# Altium integrated library Resistores_PTH.IntLib: 78 symbols
Pins are listed as number, name and electrical type; pins without a type are passive.

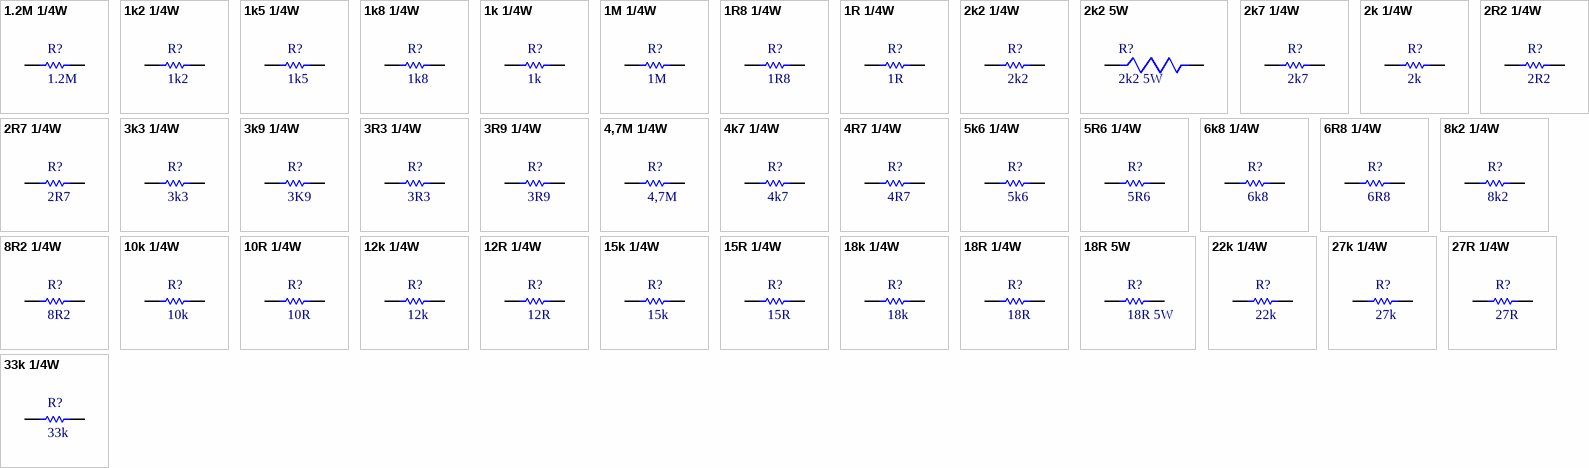
[diagram p0: symbols 1.2M 1/4W to 33k 1/4W]

## 1.2M 1/4W
designator R?, comment 1.2M
RESISTOR AXIAL 1.2M 1/4W +-5%
footprint 1.2M 1/4W RES-50
footprint 1.2M 1/4W RES-40
pins: 1, 2

## 1k2 1/4W
designator R?, comment 1k2
RESISTOR AXIAL 1k2 1/4W +-5%
footprint 1k2 1/4W RES-40
pins: 1, 2

## 1k5 1/4W
designator R?, comment 1k5
RESISTOR AXIAL 1k5 1/4W +-5%
footprint 1k5 1/4W RES-40
pins: 1, 2

## 1k8 1/4W
designator R?, comment 1k8
RESISTOR AXIAL 1k8 1/4W +-5%
footprint 1k8 1/4W RES-40
pins: 1, 2

## 1k 1/4W
designator R?, comment 1k
RESISTOR AXIAL 1kR 1/4W +-5%
footprint 1K 1/4W RES-50
footprint 1k 1/4W RES-40
pins: 1, 2

## 1M 1/4W
designator R?, comment 1M
RESISTOR AXIAL 1M 1/4W +-5%
footprint 1M 1/4W RES-50
footprint 1M 1/4W RES-40
pins: 1, 2

## 1R8 1/4W
designator R?, comment 1R8
RESISTOR AXIAL 1R8 1/4W +-5%
footprint 1R8 1/4W RES-40
pins: 1, 2

## 1R 1/4W
designator R?, comment 1R
RESISTOR AXIAL 1R 1/4W +-5%
footprint 1R 1/4W RES-50
footprint 1R 1/4W RES-40
pins: 1, 2

## 2k2 1/4W
designator R?, comment 2k2
RESISTOR AXIAL 2k2 1/4W +-5%
footprint 2k2 1/4W RES-40
pins: 1, 2

## 2k2 5W
designator R?
RESISTOR AXIAL 2k2 5W 10%
footprint 2K2 5W 10% 24mm
pins: 1, 2

## 2k7 1/4W
designator R?, comment 2k7
RESISTOR AXIAL 2k7 1/4W +-5%
footprint 2k7 1/4W RES-40
pins: 1, 2

## 2k 1/4W
designator R?, comment 2k
RESISTOR AXIAL 2k 1/4W +-5%
footprint 2k 1/4W RES-40
pins: 1, 2

## 2R2 1/4W
designator R?, comment 2R2
RESISTOR AXIAL 2R2 1/4W +-5%
footprint 2R2 1/4W RES-40
pins: 1, 2

## 2R7 1/4W
designator R?, comment 2R7
RESISTOR AXIAL 2R7 1/4W +-5%
footprint 2R7 1/4W RES-40
pins: 1, 2

## 3k3 1/4W
designator R?, comment 3k3
RESISTOR AXIAL 3k3 1/4W +-5%
footprint 3k3 1/4W RES-40
pins: 1, 2

## 3k9 1/4W
designator R?, comment 3K9
RESISTOR AXIAL 3k9 1/4W +-5%
footprint 3k9 1/4W RES-40
pins: 1, 2

## 3R3 1/4W
designator R?, comment 3R3
RESISTOR AXIAL 3R3 1/4W +-5%
footprint 3R3 1/4W RES-40
pins: 1, 2

## 3R9 1/4W
designator R?, comment 3R9
RESISTOR AXIAL 3R9 1/4W +-5%
footprint 3R9 1/4W RES-40
pins: 1, 2

## 4,7M 1/4W
designator R?, comment 4,7M
RESISTOR AXIAL 4,7M 1/4W +-5%
footprint 4.7M 1/4W RES-50
pins: 1, 2

## 4k7 1/4W
designator R?, comment 4k7
RESISTOR AXIAL 4k7 1/4W +-5%
footprint 4k7 1/4W RES-50
footprint 4k7 1/4W RES-40
pins: 1, 2

## 4R7 1/4W
designator R?, comment 4R7
RESISTOR AXIAL 4R7 1/4W +-5%
footprint 4R7 1/4W RES-50
footprint 4R7 1/4W RES-40
pins: 1, 2

## 5k6 1/4W
designator R?, comment 5k6
RESISTOR AXIAL 5k6 1/4W +-5%
footprint 5k6 1/4W RES-40
pins: 1, 2

## 5R6 1/4W
designator R?, comment 5R6
RESISTOR AXIAL 5R6 1/4W +-5%
footprint 5R6 1/4W RES-40
pins: 1, 2

## 6k8 1/4W
designator R?, comment 6k8
RESISTOR AXIAL 6k8 1/4W +-5%
footprint 6K8 1/4W RES-50
footprint 6k8 1/4W RES-40
pins: 1, 2

## 6R8 1/4W
designator R?, comment 6R8
RESISTOR AXIAL 6R8 1/4W +-5%
footprint 6R8 1/4W RES-40
pins: 1, 2

## 8k2 1/4W
designator R?, comment 8k2
RESISTOR AXIAL 8k2 1/4W +-5%
footprint 8k2 1/4W RES-40
pins: 1, 2

## 8R2 1/4W
designator R?, comment 8R2
RESISTOR AXIAL 8R2 1/4W +-5%
footprint 8R2 1/4W RES-40
pins: 1, 2

## 10k 1/4W
designator R?, comment 10k
RESISTOR AXIAL 10k 1/4W +-5%
footprint 10K 1/4W RES-50
footprint 10k 1/4W RES-40
pins: 1, 2

## 10R 1/4W
designator R?, comment 10R
RESISTOR AXIAL 10R 1/4W +-5%
footprint 10R 1/4W RES-40
pins: 1, 2

## 12k 1/4W
designator R?, comment 12k
RESISTOR AXIAL 12k 1/4W +-5%
footprint 12k 1/4W RES-40
pins: 1, 2

## 12R 1/4W
designator R?, comment 12R
RESISTOR AXIAL 12R 1/4W +-5%
footprint 12R 1/4W RES-40
pins: 1, 2

## 15k 1/4W
designator R?, comment 15k
RESISTOR AXIAL 15k 1/4W +-5%
footprint 15k 1/4W RES-40
pins: 1, 2

## 15R 1/4W
designator R?, comment 15R
RESISTOR AXIAL 15R 1/4W +-5%
footprint 15R 1/4W RES-40
pins: 1, 2

## 18k 1/4W
designator R?, comment 18k
RESISTOR AXIAL 18k 1/4W +-5%
footprint 18k 1/4W RES-40
pins: 1, 2

## 18R 1/4W
designator R?, comment 18R
RESISTOR AXIAL 18R 1/4W +-5%
footprint 18R 1/4W RES-40
pins: 1, 2

## 18R 5W
designator R?
RESISTOR AXIAL 18R 5W +-5%
footprint 18R 5W 24.5mm Lead
pins: 1, 2

## 22k 1/4W
designator R?, comment 22k
RESISTOR AXIAL 22k 1/4W +-5%
footprint 22k 1/4W RES-40
pins: 1, 2

## 27k 1/4W
designator R?, comment 27k
RESISTOR AXIAL 27k 1/4W +-5%
footprint 27k 1/4W RES-40
pins: 1, 2

## 27R 1/4W
designator R?, comment 27R
RESISTOR AXIAL 27R 1/4W +-5%
footprint 27R 1/4W RES-40
pins: 1, 2

## 33k 1/4W
designator R?, comment 33k
RESISTOR AXIAL 33k 1/4W +-5%
footprint 33K 1/4W RES-50
footprint 33K 1/4W RES-40
pins: 1, 2

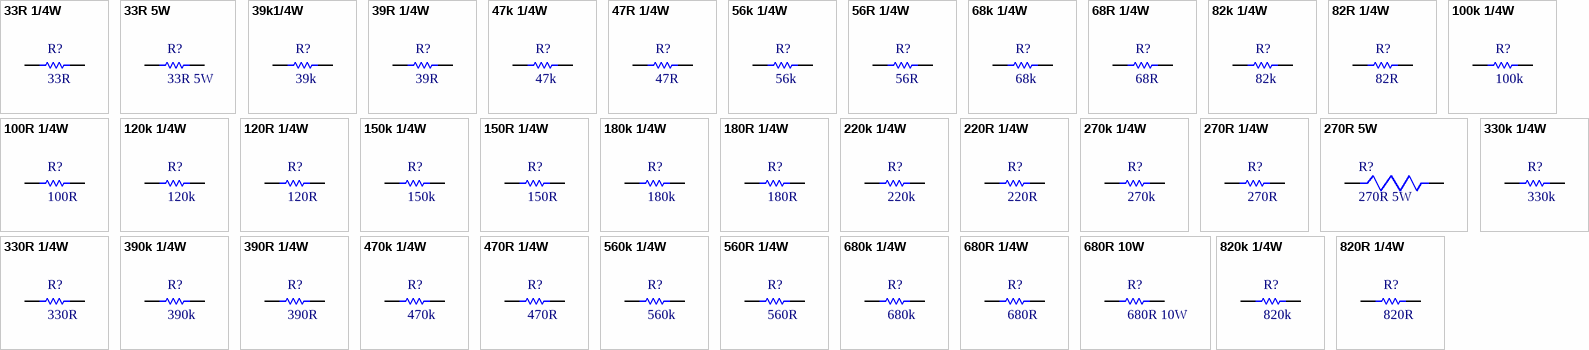
[diagram p1: symbols 33R 1/4W to 820R 1/4W]

## 33R 1/4W
designator R?, comment 33R
RESISTOR AXIAL 33R 1/4W +-5%
footprint 33R 1/4W RES-40
pins: 1, 2

## 33R 5W
designator R?
RESISTOR AXIAL 33R 5W 5%
footprint 33R 5W 24.5mm Lead
pins: 1, 2

## 39k1/4W
designator R?, comment 39k
RESISTOR AXIAL 39k 1/4W +-5%
footprint 39k 1/4W RES-40
pins: 1, 2

## 39R 1/4W
designator R?, comment 39R
RESISTOR AXIAL 39R 1/4W +-5%
footprint 39R 1/4W RES-40
pins: 1, 2

## 47k 1/4W
designator R?, comment 47k
RESISTOR AXIAL 47k 1/4W +-5%
footprint 47k 1/4W RES-40
pins: 1, 2

## 47R 1/4W
designator R?, comment 47R
RESISTOR AXIAL 47R 1/4W +-5%
footprint 47R 1/4W RES-40
pins: 1, 2

## 56k 1/4W
designator R?, comment 56k
RESISTOR AXIAL 56k 1/4W +-5%
footprint 56k 1/4W RES-40
pins: 1, 2

## 56R 1/4W
designator R?, comment 56R
RESISTOR AXIAL 56R 1/4W +-5%
footprint 56R 1/4W RES-40
pins: 1, 2

## 68k 1/4W
designator R?, comment 68k
RESISTOR AXIAL 68k 1/4W +-5%
footprint 68K 1/4W RES-40
pins: 1, 2

## 68R 1/4W
designator R?, comment 68R
RESISTOR AXIAL 68R 1/4W +-5%
footprint 68R 1/4W RES-40
pins: 1, 2

## 82k 1/4W
designator R?, comment 82k
RESISTOR AXIAL 82k 1/4W +-5%
footprint 82k 1/4W RES-40
pins: 1, 2

## 82R 1/4W
designator R?, comment 82R
RESISTOR AXIAL 82R 1/4W +-5%
footprint 82R 1/4W RES-40
pins: 1, 2

## 100k 1/4W
designator R?, comment 100k
RESISTOR AXIAL 100k 1/4W +-5%
footprint 100K 1/4W RES-50
footprint 100k 1/4W RES-40
pins: 1, 2

## 100R 1/4W
designator R?, comment 100R
RESISTOR AXIAL 100R 1/4W +-5%
footprint 100R 1/4W RES-50
footprint 100R 1/4W RES-40
pins: 1, 2

## 120k 1/4W
designator R?, comment 120k
RESISTOR AXIAL 120k 1/4W +-5%
footprint 120k 1/4W RES-40
pins: 1, 2

## 120R 1/4W
designator R?, comment 120R
RESISTOR AXIAL 120R 1/4W +-5%
footprint 120R 1/4W RES-40
pins: 1, 2

## 150k 1/4W
designator R?, comment 150k
RESISTOR AXIAL 150k 1/4W +-5%
footprint 150K 1/4W RES-50
footprint 150k 1/4W RES-40
pins: 1, 2

## 150R 1/4W
designator R?, comment 150R
RESISTOR AXIAL 150R 1/4W +-5%
footprint 150R 1/4W RES-40
pins: 1, 2

## 180k 1/4W
designator R?, comment 180k
RESISTOR AXIAL 180k 1/4W +-5%
footprint 180k 1/4W RES-40
pins: 1, 2

## 180R 1/4W
designator R?, comment 180R
RESISTOR AXIAL 180R 1/4W +-5%
footprint 180R 1/4W RES-40
pins: 1, 2

## 220k 1/4W
designator R?, comment 220k
RESISTOR AXIAL 220k 1/4W +-5%
footprint 220k 1/4W RES-40
pins: 1, 2

## 220R 1/4W
designator R?, comment 220R
RESISTOR AXIAL 220R 1/4W +-5%
footprint 220R 1/4W RES-40
pins: 1, 2

## 270k 1/4W
designator R?, comment 270k
RESISTOR AXIAL 270k 1/4W +-5%
footprint 270k 1/4W RES-40
pins: 1, 2

## 270R 1/4W
designator R?, comment 270R
RESISTOR AXIAL 270R 1/4W +-5%
footprint 270R 1/4W RES-40
pins: 1, 2

## 270R 5W
designator R?
RESISTOR AXIAL 270R 5W 5%
footprint 270R 5W 5% 24mm
pins: 1, 2

## 330k 1/4W
designator R?, comment 330k
RESISTOR AXIAL 330k 1/4W +-5%
footprint 330K 1/4W RES-50
footprint 330K 1/4W RES-40
pins: 1, 2

## 330R 1/4W
designator R?, comment 330R
RESISTOR AXIAL 330R 1/4W +-5%
footprint 330R 1/4W RES-40
pins: 1, 2

## 390k 1/4W
designator R?, comment 390k
RESISTOR AXIAL 390k 1/4W +-5%
footprint 390k 1/4W RES-40
pins: 1, 2

## 390R 1/4W
designator R?, comment 390R
RESISTOR AXIAL 390R 1/4W +-5%
footprint 390R 1/4W RES-40
pins: 1, 2

## 470k 1/4W
designator R?, comment 470k
RESISTOR AXIAL 470k 1/4W +-5%
footprint 470K 1/4W RES-50
footprint 470k 1/4W RES-40
pins: 1, 2

## 470R 1/4W
designator R?, comment 470R
RESISTOR AXIAL 470R 1/4W +-5%
footprint 470R 1/4W RES-50
footprint 470R 1/4W RES-40
pins: 1, 2

## 560k 1/4W
designator R?, comment 560k
RESISTOR AXIAL 560k 1/4W +-5%
footprint 560K 1/4W RES-50
footprint 560k 1/4W RES-40
pins: 1, 2

## 560R 1/4W
designator R?, comment 560R
RESISTOR AXIAL 560R 1/4W +-5%
footprint 560R 1/4W RES-40
pins: 1, 2

## 680k 1/4W
designator R?, comment 680k
RESISTOR AXIAL 680k 1/4W +-5%
footprint 680k 1/4W RES-40
pins: 1, 2

## 680R 1/4W
designator R?, comment 680R
RESISTOR AXIAL 680R 1/4W +-5%
footprint 680R 1/4W RES-40
pins: 1, 2

## 680R 10W
designator R?
RESISTOR AXIAL 680R 10W +-5% 50mm lead
footprint 680R 10W 50mm LEAD
pins: 1, 2

## 820k 1/4W
designator R?, comment 820k
RESISTOR AXIAL 820k 1/4W +-5% .4 in lead
footprint 820k 1/4W RES-40
pins: 1, 2

## 820R 1/4W
designator R?, comment 820R
RESISTOR AXIAL 820R 1/4W +-5% .4 in lead
footprint 820R 1/4W RES-40
pins: 1, 2